# Altium schematic symbol library CHAR-112A90C.SchLib: 1 symbol
Pins are listed as number, name and electrical type; pins without a type are passive.

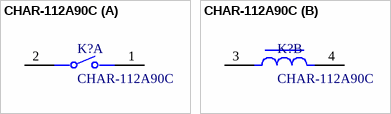
[diagram p0: symbol CHAR-112A90C]

## CHAR-112A90C
designator K?
footprint CHAR-112A90C
footprint CHAR-112A75C
part A pins: 1, 2
part B pins: 3, 4